# Altium footprint library WR-PHD_Socket Header.PcbLib: 279 footprints (part 13 of 18)
Each footprint in its own frame and in the unit in brackets; x right, y up, seen from the top. Pads: shape width x height; smd on the part's side, far side on the other; paste and mask are expansions set on the pad; w line width, h text height; cw(c..) or ccw(c..) is an arc to the next point about the centre after c.
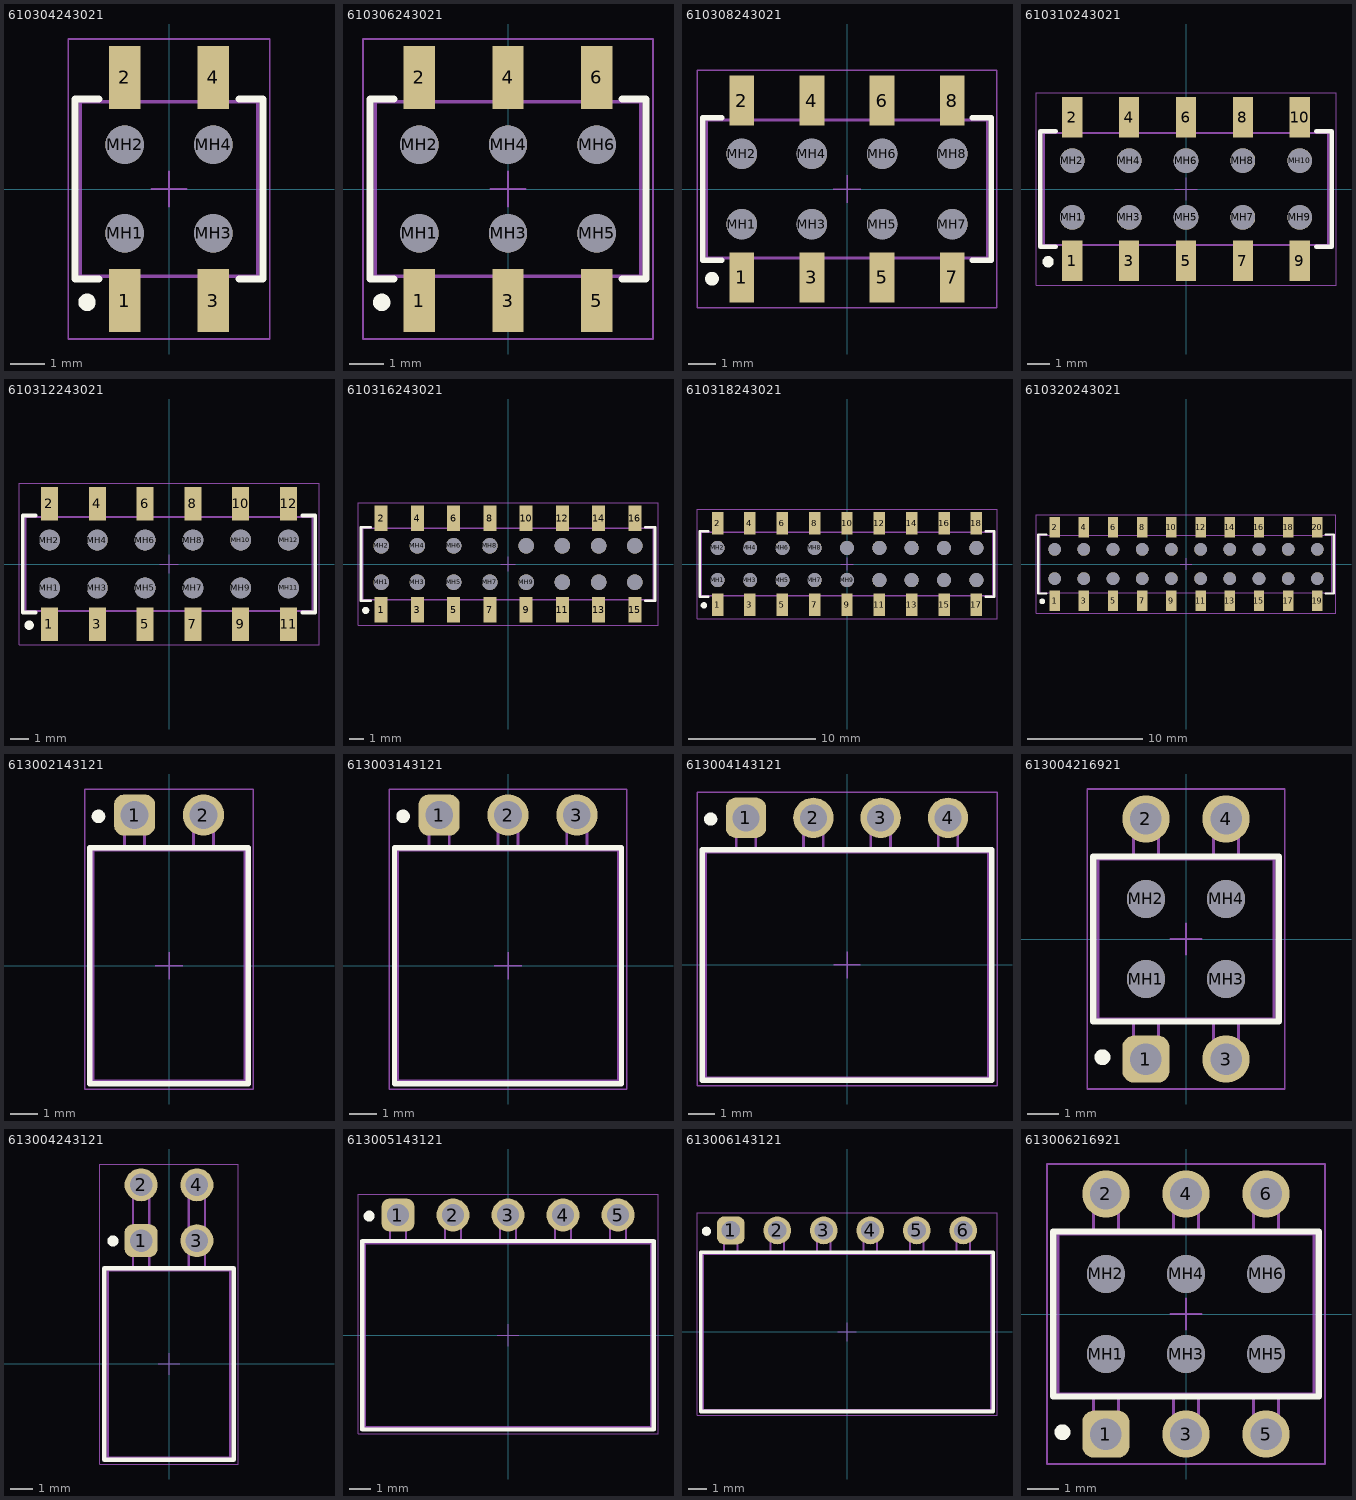
[diagram p12: the footprints below, top view; thin cyan lines are the x and y axes]

## 610304243021 [mm] "Socket Header, Pitch 2.54 mm, SMT, Vertical, dual row, 4p"
height 3.7
pads (8):
  rect 0.9x1.8 smd: 1(-1.27,-3.2) 2(-1.27,3.2) 3(1.27,-3.2) 4(1.27,3.2)
  round 1.1 hole 1.1 unplated: MH1(-1.27,-1.27) MH2(-1.27,1.27) MH3(1.27,-1.27) MH4(1.27,1.27)
Top Overlay:
  circle w0.25: c-2.35,-3.25 r0.125
  lines w0.2: -2,-2.575 -2.69,-2.575 -2.69,2.575 -2,2.575 ; 2,-2.575 2.69,-2.575 2.69,2.575 2,2.575
Top Designator:
  text ".Designator" at -7.498,-0.5 h1.5
Top Component Outline:
  lines w0.1: -1.52,-2.5 -1.52,-3.6 -1.02,-3.6 -1.02,-2.5 ; -1.52,2.5 -1.52,3.6 -1.02,3.6 -1.02,2.5 ; 1.02,-2.5 1.02,-3.6 1.52,-3.6 1.52,-2.5 ; 1.02,2.5 1.02,3.6 1.52,3.6 1.52,2.5 ; -2.54,-2.5 -2.54,2.5 2.54,2.5 2.54,-2.5 -2.54,-2.5
Top Courtyard:
  lines w0.05: -2.89,-4.3 -2.89,4.3 2.89,4.3 2.89,-4.3 -2.89,-4.3
Top Component Center:
  lines w0.05: -0.5,0 0.5,0 ; 0,-0.5 0,0.5
3D body "610304243021.stp": height 4.69, standoff 0, extent -2.54,-3.601 2.54,3.601

## 610306243021 [mm] "Socket Header, Pitch 2.54 mm, SMT, Vertical, dual row, 6p"
height 3.7
pads (12):
  rect 0.9x1.8 smd: 1(-2.54,-3.2) 2(-2.54,3.2) 3(0,-3.2) 4(0,3.2) 5(2.54,-3.2) 6(2.54,3.2)
  round 1.1 hole 1.1 unplated: MH1(-2.54,-1.27) MH2(-2.54,1.27) MH3(0,-1.27) MH4(0,1.27) MH5(2.54,-1.27) MH6(2.54,1.27)
Top Overlay:
  circle w0.25: c-3.62,-3.25 r0.125
  lines w0.2: -3.27,-2.575 -3.96,-2.575 -3.96,2.575 -3.27,2.575 ; 3.27,-2.575 3.96,-2.575 3.96,2.575 3.27,2.575
Top Designator:
  text ".Designator" at -7.498,-0.5 h1.5
Top Component Outline:
  lines w0.1: -2.79,-2.5 -2.79,-3.6 -2.29,-3.6 -2.29,-2.5 ; -2.79,2.5 -2.79,3.6 -2.29,3.6 -2.29,2.5 ; -0.25,-2.5 -0.25,-3.6 0.25,-3.6 0.25,-2.5 ; -0.25,2.5 -0.25,3.6 0.25,3.6 0.25,2.5 ; 2.29,-2.5 2.29,-3.6 2.79,-3.6 2.79,-2.5 ; 2.29,2.5 2.29,3.6 2.79,3.6 2.79,2.5 ; -3.81,-2.5 -3.81,2.5 3.81,2.5 3.81,-2.5 -3.81,-2.5
Top Courtyard:
  lines w0.05: -4.16,-4.3 4.16,-4.3 4.16,4.3 -4.16,4.3 -4.16,-4.3
Top Component Center:
  lines w0.05: -0.5,0 0.5,0 ; 0,-0.5 0,0.5
3D body "610306243021.stp": height 4.68, standoff 0, extent -3.81,-3.601 3.81,3.601

## 610308243021 [mm] "Socket Header, Pitch 2.54 mm, SMT, Vertical, dual row, 8p"
height 3.7
pads (16):
  rect 0.9x1.8 smd: 1(-3.81,-3.2) 2(-3.81,3.2) 3(-1.27,-3.2) 4(-1.27,3.2) 5(1.27,-3.2) 6(1.27,3.2) 7(3.81,-3.2) 8(3.81,3.2)
  round 1.1 hole 1.1 unplated: MH1(-3.81,-1.27) MH2(-3.81,1.27) MH3(-1.27,-1.27) MH4(-1.27,1.27) MH5(1.27,-1.27) MH6(1.27,1.27) MH7(3.81,-1.27) MH8(3.81,1.27)
Top Overlay:
  circle w0.25: c-4.89,-3.25 r0.125
  lines w0.2: -4.54,-2.575 -5.23,-2.575 -5.23,2.575 -4.54,2.575 ; 4.54,-2.575 5.23,-2.575 5.23,2.575 4.54,2.575
Top Designator:
  text ".Designator" at -7.498,-0.5 h1.5
Top Component Outline:
  lines w0.1: -4.06,-2.5 -4.06,-3.6 -3.56,-3.6 -3.56,-2.5 ; -4.06,2.5 -4.06,3.6 -3.56,3.6 -3.56,2.5 ; -1.52,-2.5 -1.52,-3.6 -1.02,-3.6 -1.02,-2.5 ; -1.52,2.5 -1.52,3.6 -1.02,3.6 -1.02,2.5 ; 1.02,-2.5 1.02,-3.6 1.52,-3.6 1.52,-2.5 ; 1.02,2.5 1.02,3.6 1.52,3.6 1.52,2.5 ; 3.56,-2.5 3.56,-3.6 4.06,-3.6 4.06,-2.5 ; 3.56,2.5 3.56,3.6 4.06,3.6 4.06,2.5 ; -5.08,-2.5 5.08,-2.5 5.08,2.5 -5.08,2.5 -5.08,-2.5
Top Courtyard:
  lines w0.05: -5.43,-4.3 5.43,-4.3 5.43,4.3 -5.43,4.3 -5.43,-4.3
Top Component Center:
  lines w0.05: -0.5,0 0.5,0 ; 0,-0.5 0,0.5
3D body "610308243021.stp": height 4.68, standoff 0, extent -5.08,-3.601 5.08,3.601

## 610310243021 [mm] "Socket Header, Pitch 2.54 mm, SMT, Vertical, dual row, 10p"
height 3.7
pads (20):
  rect 0.9x1.8 smd: 1(-5.08,-3.2) 2(-5.08,3.2) 3(-2.54,-3.2) 4(-2.54,3.2) 5(0,-3.2) 6(0,3.2) 7(2.54,-3.2) 8(2.54,3.2) 9(5.08,-3.2) 10(5.08,3.2)
  round 1.1 hole 1.1 unplated: MH1(-5.08,-1.27) MH2(-5.08,1.27) MH3(-2.54,-1.27) MH4(-2.54,1.27) MH5(0,-1.27) MH6(0,1.27) MH7(2.54,-1.27) MH8(2.54,1.27) MH9(5.08,-1.27) MH10(5.08,1.27)
Top Overlay:
  circle w0.25: c-6.16,-3.25 r0.125
  lines w0.2: -5.81,-2.575 -6.5,-2.575 -6.5,2.575 -5.81,2.575 ; 5.81,-2.575 6.5,-2.575 6.5,2.575 5.81,2.575
Top Designator:
  text ".Designator" at -7.498,-0.5 h1.5
Top Component Outline:
  lines w0.1: -5.33,-2.5 -5.33,-3.6 -4.83,-3.6 -4.83,-2.5 ; -5.33,2.5 -5.33,3.6 -4.83,3.6 -4.83,2.5 ; -2.79,-2.5 -2.79,-3.6 -2.29,-3.6 -2.29,-2.5 ; -2.79,2.5 -2.79,3.6 -2.29,3.6 -2.29,2.5 ; -0.25,-2.5 -0.25,-3.6 0.25,-3.6 0.25,-2.5 ; -0.25,2.5 -0.25,3.6 0.25,3.6 0.25,2.5 ; 2.29,-2.5 2.29,-3.6 2.79,-3.6 2.79,-2.5 ; 2.29,2.5 2.29,3.6 2.79,3.6 2.79,2.5 ; 4.83,-2.5 4.83,-3.6 5.33,-3.6 5.33,-2.5 ; 4.83,2.5 4.83,3.6 5.33,3.6 5.33,2.5 ; -6.35,-2.5 -6.35,2.5 6.35,2.5 6.35,-2.5 -6.35,-2.5
Top Courtyard:
  lines w0.05: -6.7,-4.3 6.7,-4.3 6.7,4.3 -6.7,4.3 -6.7,-4.3
Top Component Center:
  lines w0.05: -0.5,0 0.5,0 ; 0,-0.5 0,0.5
3D body "610310243021.stp": height 4.68, standoff 0, extent -6.35,-3.601 6.35,3.601

## 610312243021 [mm] "Socket Header, Pitch 2.54 mm, SMT, Vertical, dual row, 12p"
height 3.7
pads (24):
  rect 0.9x1.8 smd: 1(-6.35,-3.2) 2(-6.35,3.2) 3(-3.81,-3.2) 4(-3.81,3.2) 5(-1.27,-3.2) 6(-1.27,3.2) 7(1.27,-3.2) 8(1.27,3.2) 9(3.81,-3.2) 10(3.81,3.2) 11(6.35,-3.2) 12(6.35,3.2)
  round 1.1 hole 1.1 unplated: MH1(-6.35,-1.27) MH2(-6.35,1.27) MH3(-3.81,-1.27) MH4(-3.81,1.27) MH5(-1.27,-1.27) MH6(-1.27,1.27) MH7(1.27,-1.27) MH8(1.27,1.27) MH9(3.81,-1.27) MH10(3.81,1.27) MH11(6.35,-1.27) MH12(6.35,1.27)
Top Overlay:
  circle w0.25: c-7.43,-3.25 r0.125
  lines w0.2: -7.08,-2.575 -7.77,-2.575 -7.77,2.575 -7.08,2.575 ; 7.08,-2.575 7.77,-2.575 7.77,2.575 7.08,2.575
Top Designator:
  text ".Designator" at -7.498,-0.5 h1.5
Top Component Outline:
  lines w0.1: -6.6,-2.5 -6.6,-3.6 -6.1,-3.6 -6.1,-2.5 ; -6.6,2.5 -6.6,3.6 -6.1,3.6 -6.1,2.5 ; -4.06,-2.5 -4.06,-3.6 -3.56,-3.6 -3.56,-2.5 ; -4.06,2.5 -4.06,3.6 -3.56,3.6 -3.56,2.5 ; -1.52,-2.5 -1.52,-3.6 -1.02,-3.6 -1.02,-2.5 ; -1.52,2.5 -1.52,3.6 -1.02,3.6 -1.02,2.5 ; 1.02,-2.5 1.02,-3.6 1.52,-3.6 1.52,-2.5 ; 1.02,2.5 1.02,3.6 1.52,3.6 1.52,2.5 ; 3.56,-2.5 3.56,-3.6 4.06,-3.6 4.06,-2.5 ; 3.56,2.5 3.56,3.6 4.06,3.6 4.06,2.5 ; 6.1,-2.5 6.1,-3.6 6.6,-3.6 6.6,-2.5 ; 6.1,2.5 6.1,3.6 6.6,3.6 6.6,2.5 ; -7.62,-2.5 -7.62,2.5 7.62,2.5 7.62,-2.5 -7.62,-2.5
Top Courtyard:
  lines w0.05: -7.97,-4.3 7.97,-4.3 7.97,4.3 -7.97,4.3 -7.97,-4.3
Top Component Center:
  lines w0.05: -0.5,0 0.5,0 ; 0,-0.5 0,0.5
3D body "610312243021.stp": height 4.68, standoff 0, extent -7.62,-3.601 7.62,3.601

## 610316243021 [mm] "Socket Header, Pitch 2.54 mm, SMT, Vertical, dual row, 16p"
height 3.7
pads (32):
  rect 0.9x1.8 smd: 1(-8.89,-3.2) 2(-8.89,3.2) 3(-6.35,-3.2) 4(-6.35,3.2) 5(-3.81,-3.2) 6(-3.81,3.2) 7(-1.27,-3.2) 8(-1.27,3.2) 9(1.27,-3.2) 10(1.27,3.2) 11(3.81,-3.2) 12(3.81,3.2) 13(6.35,-3.2) 14(6.35,3.2) 15(8.89,-3.2) 16(8.89,3.2)
  round 1.1 hole 1.1 unplated: MH1(-8.89,-1.27) MH2(-8.89,1.27) MH3(-6.35,-1.27) MH4(-6.35,1.27) MH5(-3.81,-1.27) MH6(-3.81,1.27) MH7(-1.27,-1.27) MH8(-1.27,1.27) MH9(1.27,-1.27) MH10(1.27,1.27) MH11(3.81,-1.27) MH12(3.81,1.27) MH13(6.35,-1.27) MH14(6.35,1.27) MH15(8.89,-1.27) MH16(8.89,1.27)
Top Overlay:
  circle w0.25: c-9.97,-3.25 r0.125
  lines w0.2: -9.62,-2.575 -10.31,-2.575 -10.31,2.575 -9.62,2.575 ; 9.62,-2.575 10.31,-2.575 10.31,2.575 9.62,2.575
Top Designator:
  text ".Designator" at -7.498,-0.5 h1.5
Top Component Outline:
  lines w0.1: -9.14,-2.5 -9.14,-3.6 -8.64,-3.6 -8.64,-2.5 ; -9.14,2.5 -9.14,3.6 -8.64,3.6 -8.64,2.5 ; -6.6,-2.5 -6.6,-3.6 -6.1,-3.6 -6.1,-2.5 ; -6.6,2.5 -6.6,3.6 -6.1,3.6 -6.1,2.5 ; -4.06,-2.5 -4.06,-3.6 -3.56,-3.6 -3.56,-2.5 ; -4.06,2.5 -4.06,3.6 -3.56,3.6 -3.56,2.5 ; -1.52,-2.5 -1.52,-3.6 -1.02,-3.6 -1.02,-2.5 ; -1.52,2.5 -1.52,3.6 -1.02,3.6 -1.02,2.5 ; 1.02,-2.5 1.02,-3.6 1.52,-3.6 1.52,-2.5 ; 1.02,2.5 1.02,3.6 1.52,3.6 1.52,2.5 ; 3.56,-2.5 3.56,-3.6 4.06,-3.6 4.06,-2.5 ; 3.56,2.5 3.56,3.6 4.06,3.6 4.06,2.5 ; 6.1,-2.5 6.1,-3.6 6.6,-3.6 6.6,-2.5 ; 6.1,2.5 6.1,3.6 6.6,3.6 6.6,2.5 ; 8.64,-2.5 8.64,-3.6 9.14,-3.6 9.14,-2.5 ; 8.64,2.5 8.64,3.6 9.14,3.6 9.14,2.5 ; -10.16,-2.5 10.16,-2.5 10.16,2.5 -10.16,2.5 -10.16,-2.5
Top Courtyard:
  lines w0.05: -10.51,-4.3 -10.51,4.3 10.51,4.3 10.51,-4.3 -10.51,-4.3
Top Component Center:
  lines w0.05: -0.5,0 0.5,0 ; 0,-0.5 0,0.5
3D body "610316243021.stp": height 4.68, standoff 0, extent -10.16,-3.601 10.16,3.601

## 610318243021 [mm] "Socket Header, Pitch 2.54 mm, SMT, Vertical, dual row, 18p"
height 3.7
pads (36):
  rect 0.9x1.8 smd: 1(-10.16,-3.2) 2(-10.16,3.2) 3(-7.62,-3.2) 4(-7.62,3.2) 5(-5.08,-3.2) 6(-5.08,3.2) 7(-2.54,-3.2) 8(-2.54,3.2) 9(0,-3.2) 10(0,3.2) 11(2.54,-3.2) 12(2.54,3.2) 13(5.08,-3.2) 14(5.08,3.2) 15(7.62,-3.2) 16(7.62,3.2) 17(10.16,-3.2) 18(10.16,3.2)
  round 1.1 hole 1.1 unplated: MH1(-10.16,-1.27) MH2(-10.16,1.27) MH3(-7.62,-1.27) MH4(-7.62,1.27) MH5(-5.08,-1.27) MH6(-5.08,1.27) MH7(-2.54,-1.27) MH8(-2.54,1.27) MH9(0,-1.27) MH10(0,1.27) MH11(2.54,-1.27) MH12(2.54,1.27) MH13(5.08,-1.27) MH14(5.08,1.27) MH15(7.62,-1.27) MH16(7.62,1.27) MH17(10.16,-1.27) MH18(10.16,1.27)
Top Overlay:
  circle w0.25: c-11.24,-3.25 r0.125
  lines w0.2: -10.89,-2.575 -11.58,-2.575 -11.58,2.575 -10.89,2.575 ; 10.89,-2.575 11.58,-2.575 11.58,2.575 10.89,2.575
Top Designator:
  text ".Designator" at -7.498,-0.5 h1.5
Top Component Outline:
  lines w0.1: -10.41,-2.5 -10.41,-3.6 -9.91,-3.6 -9.91,-2.5 ; -10.41,2.5 -10.41,3.6 -9.91,3.6 -9.91,2.5 ; -7.87,-2.5 -7.87,-3.6 -7.37,-3.6 -7.37,-2.5 ; -7.87,2.5 -7.87,3.6 -7.37,3.6 -7.37,2.5 ; -5.33,-2.5 -5.33,-3.6 -4.83,-3.6 -4.83,-2.5 ; -5.33,2.5 -5.33,3.6 -4.83,3.6 -4.83,2.5 ; -2.79,-2.5 -2.79,-3.6 -2.29,-3.6 -2.29,-2.5 ; -2.79,2.5 -2.79,3.6 -2.29,3.6 -2.29,2.5 ; -0.25,-2.5 -0.25,-3.6 0.25,-3.6 0.25,-2.5 ; -0.25,2.5 -0.25,3.6 0.25,3.6 0.25,2.5 ; 2.29,-2.5 2.29,-3.6 2.79,-3.6 2.79,-2.5 ; 2.29,2.5 2.29,3.6 2.79,3.6 2.79,2.5 ; 4.83,-2.5 4.83,-3.6 5.33,-3.6 5.33,-2.5 ; 4.83,2.5 4.83,3.6 5.33,3.6 5.33,2.5 ; 7.37,-2.5 7.37,-3.6 7.87,-3.6 7.87,-2.5 ; 7.37,2.5 7.37,3.6 7.87,3.6 7.87,2.5 ; 9.91,-2.5 9.91,-3.6 10.41,-3.6 10.41,-2.5 ; 9.91,2.5 9.91,3.6 10.41,3.6 10.41,2.5 ; -11.43,-2.5 -11.43,2.5 11.43,2.5 11.43,-2.5 -11.43,-2.5
Top Courtyard:
  lines w0.05: -11.78,-4.3 -11.78,4.3 11.78,4.3 11.78,-4.3 -11.78,-4.3
Top Component Center:
  lines w0.05: -0.5,0 0.5,0 ; 0,-0.5 0,0.5
3D body "610318243021.stp": height 4.68, standoff 0, extent -11.43,-3.601 11.43,3.601

## 610320243021 [mm] "Socket Header, Pitch 2.54 mm, SMT, Vertical, dual row, 20p"
height 3.7
pads (40):
  rect 0.9x1.8 smd: 1(-11.43,-3.2) 2(-11.43,3.2) 3(-8.89,-3.2) 4(-8.89,3.2) 5(-6.35,-3.2) 6(-6.35,3.2) 7(-3.81,-3.2) 8(-3.81,3.2) 9(-1.27,-3.2) 10(-1.27,3.2) 11(1.27,-3.2) 12(1.27,3.2) 13(3.81,-3.2) 14(3.81,3.2) 15(6.35,-3.2) 16(6.35,3.2) 17(8.89,-3.2) 18(8.89,3.2) 19(11.43,-3.2) 20(11.43,3.2)
  round 1.1 hole 1.1 unplated: MH1(-11.43,-1.27) MH2(-11.43,1.27) MH3(-8.89,-1.27) MH4(-8.89,1.27) MH5(-6.35,-1.27) MH6(-6.35,1.27) MH7(-3.81,-1.27) MH8(-3.81,1.27) MH9(-1.27,-1.27) MH10(-1.27,1.27) MH11(1.27,-1.27) MH12(1.27,1.27) MH13(3.81,-1.27) MH14(3.81,1.27) MH15(6.35,-1.27) MH16(6.35,1.27) MH17(8.89,-1.27) MH18(8.89,1.27) MH19(11.43,-1.27) MH20(11.43,1.27)
Top Overlay:
  circle w0.25: c-12.51,-3.25 r0.125
  lines w0.2: -12.16,-2.575 -12.85,-2.575 -12.85,2.575 -12.16,2.575 ; 12.16,-2.575 12.85,-2.575 12.85,2.575 12.16,2.575
Top Designator:
  text ".Designator" at -7.498,-0.5 h1.5
Top Component Outline:
  lines w0.1: -11.68,-2.5 -11.68,-3.6 -11.18,-3.6 -11.18,-2.5 ; -11.68,2.5 -11.68,3.6 -11.18,3.6 -11.18,2.5 ; -9.14,-2.5 -9.14,-3.6 -8.64,-3.6 -8.64,-2.5 ; -9.14,2.5 -9.14,3.6 -8.64,3.6 -8.64,2.5 ; -6.6,-2.5 -6.6,-3.6 -6.1,-3.6 -6.1,-2.5 ; -6.6,2.5 -6.6,3.6 -6.1,3.6 -6.1,2.5 ; -4.06,-2.5 -4.06,-3.6 -3.56,-3.6 -3.56,-2.5 ; -4.06,2.5 -4.06,3.6 -3.56,3.6 -3.56,2.5 ; -1.52,-2.5 -1.52,-3.6 -1.02,-3.6 -1.02,-2.5 ; -1.52,2.5 -1.52,3.6 -1.02,3.6 -1.02,2.5 ; 1.02,-2.5 1.02,-3.6 1.52,-3.6 1.52,-2.5 ; 1.02,2.5 1.02,3.6 1.52,3.6 1.52,2.5 ; 3.56,-2.5 3.56,-3.6 4.06,-3.6 4.06,-2.5 ; 3.56,2.5 3.56,3.6 4.06,3.6 4.06,2.5 ; 6.1,-2.5 6.1,-3.6 6.6,-3.6 6.6,-2.5 ; 6.1,2.5 6.1,3.6 6.6,3.6 6.6,2.5 ; 8.64,-2.5 8.64,-3.6 9.14,-3.6 9.14,-2.5 ; 8.64,2.5 8.64,3.6 9.14,3.6 9.14,2.5 ; 11.18,-2.5 11.18,-3.6 11.68,-3.6 11.68,-2.5 ; 11.18,2.5 11.18,3.6 11.68,3.6 11.68,2.5 ; -12.7,-2.5 -12.7,2.5 12.7,2.5 12.7,-2.5 -12.7,-2.5
Top Courtyard:
  lines w0.05: -13.05,-4.3 -13.05,4.3 13.05,4.3 13.05,-4.3 -13.05,-4.3
Top Component Center:
  lines w0.05: -0.5,0 0.5,0 ; 0,-0.5 0,0.5
3D body "610320243021.stp": height 4.68, standoff 0, extent -12.7,-3.601 12.7,3.601

## 613002143121 [mm] "Socket Header, Pitch 2.54 mm, THT, Angled, single row, 2p"
height 2.5
pads (2):
  rrect50% 1.52x1.52 hole 1.02: 1(-1.27,5.55)
  round 1.52 hole 1.02: 2(1.27,5.55)
Top Overlay:
  circle w0.25: c-2.6,5.5 r0.125
  lines w0.2: -2.915,-4.35 -2.915,4.35 2.915,4.35 2.915,-4.35 -2.915,-4.35
Top Designator:
  text ".Designator" at -7.498,-0.5 h1.5
Top Component Outline:
  lines w0.1: -1.64,4.25 -1.64,5.75 -0.9,5.75 -0.9,4.25 ; 0.9,4.25 0.9,5.75 1.64,5.75 1.64,4.25 ; -2.79,-4.25 -2.79,4.25 2.79,4.25 2.79,-4.25 -2.79,-4.25
Top Courtyard:
  lines w0.05: -3.115,-4.55 3.115,-4.55 3.115,6.51 -3.115,6.51 -3.115,-4.55
Top Component Center:
  lines w0.05: -0.5,0 0.5,0 ; 0,-0.5 0,0.5
3D body "613002143121.stp": height 2.55, standoff -3.04, extent -2.79,-4.25 2.79,5.75

## 613003143121 [mm] "Socket Header, Pitch 2.54 mm, THT, Angled, single row, 3p"
height 2.5
pads (3):
  rrect50% 1.52x1.52 hole 1.02: 1(-2.54,5.55)
  round 1.52 hole 1.02: 2(0,5.55) 3(2.54,5.55)
Top Overlay:
  circle w0.25: c-3.87,5.5 r0.125
  lines w0.2: -4.185,-4.35 4.185,-4.35 4.185,4.35 -4.185,4.35 -4.185,-4.35
Top Designator:
  text ".Designator" at -7.498,-0.5 h1.5
Top Component Outline:
  lines w0.1: -2.91,4.25 -2.91,5.75 -2.17,5.75 -2.17,4.25 ; -0.37,4.25 -0.37,5.75 0.37,5.75 0.37,4.25 ; 2.17,4.25 2.17,5.75 2.91,5.75 2.91,4.25 ; -4.06,-4.25 4.06,-4.25 4.06,4.25 -4.06,4.25 -4.06,-4.25
Top Courtyard:
  lines w0.05: -4.385,-4.55 -4.385,6.51 4.385,6.51 4.385,-4.55 -4.385,-4.55
Top Component Center:
  lines w0.05: -0.5,0 0.5,0 ; 0,-0.5 0,0.5
3D body "613003143121.stp": height 2.55, standoff -3.04, extent -4.06,-4.25 4.06,5.75

## 613004143121 [mm] "Socket Header, Pitch 2.54 mm, THT, Angled, single row, 4p"
height 2.5
pads (4):
  rrect50% 1.52x1.52 hole 1.02: 1(-3.81,5.55)
  round 1.52 hole 1.02: 2(-1.27,5.55) 3(1.27,5.55) 4(3.81,5.55)
Top Overlay:
  circle w0.25: c-5.14,5.5 r0.125
  lines w0.2: -5.455,-4.35 -5.455,4.35 5.455,4.35 5.455,-4.35 -5.455,-4.35
Top Designator:
  text ".Designator" at -7.498,-0.5 h1.5
Top Component Outline:
  lines w0.1: -4.18,4.25 -4.18,5.75 -3.44,5.75 -3.44,4.25 ; -1.64,4.25 -1.64,5.75 -0.9,5.75 -0.9,4.25 ; 0.9,4.25 0.9,5.75 1.64,5.75 1.64,4.25 ; 3.44,4.25 3.44,5.75 4.18,5.75 4.18,4.25 ; -5.33,-4.25 5.33,-4.25 5.33,4.25 -5.33,4.25 -5.33,-4.25
Top Courtyard:
  lines w0.05: -5.655,-4.55 5.655,-4.55 5.655,6.51 -5.655,6.51 -5.655,-4.55
Top Component Center:
  lines w0.05: -0.5,0 0.5,0 ; 0,-0.5 0,0.5
3D body "613004143121.stp": height 2.55, standoff -3.04, extent -5.33,-4.25 5.33,5.75

## 613004216921 [mm] "Socket Header, Pitch 2.54 mm, THT, Vertical, dual row, 4p"
height 5
pads (8):
  rrect50% 1.5x1.5 hole 1: 1(-1.27,-3.81)
  round 1.5 hole 1: 2(-1.27,3.81) 3(1.27,-3.81) 4(1.27,3.81)
  round 1.2 hole 1.2 unplated: MH1(-1.27,-1.27) MH2(-1.27,1.27) MH3(1.27,-1.27) MH4(1.27,1.27)
Top Overlay:
  circle w0.25: c-2.65,-3.75 r0.125
  lines w0.2: -2.94,-2.615 -2.94,2.615 2.94,2.615 2.94,-2.615 -2.94,-2.615
Top Designator:
  text ".Designator" at -7.498,-0.5 h1.5
Top Component Outline:
  lines w0.1: -1.67,-2.54 -1.67,-3.935 -0.87,-3.935 -0.87,-2.54 ; -1.67,2.54 -1.67,3.935 -0.87,3.935 -0.87,2.54 ; 0.87,-2.54 0.87,-3.935 1.67,-3.935 1.67,-2.54 ; 0.87,2.54 0.87,3.935 1.67,3.935 1.67,2.54 ; -2.79,-2.54 2.79,-2.54 2.79,2.54 -2.79,2.54 -2.79,-2.54
Top Courtyard:
  lines w0.05: -3.14,-4.76 -3.14,4.76 3.14,4.76 3.14,-4.76 -3.14,-4.76
Top Component Center:
  lines w0.05: -0.5,0 0.5,0 ; 0,-0.5 0,0.5
3D body "613004216921.stp": height 5.02, standoff -3.08, extent -2.79,-3.935 2.79,3.935

## 613004243121 [mm] "Socket Header, Pitch 2.54 mm, THT, Angled, dual row, 4p"
height 5.08
pads (4):
  rrect50% 1.5x1.5 hole 1.03: 1(-1.27,5.61)
  round 1.5 hole 1.03: 2(-1.27,8.15) 3(1.27,5.61) 4(1.27,8.15)
Top Overlay:
  circle w0.25: c-2.55,5.6 r0.125
  lines w0.2: -2.94,-4.35 -2.94,4.35 2.94,4.35 2.94,-4.35 -2.94,-4.35
Top Designator:
  text ".Designator" at -7.498,-0.5 h1.5
Top Component Outline:
  lines w0.1: -1.64,4.25 -1.64,8.35 -0.9,8.35 -0.9,4.25 ; -1.64,5.81 -0.9,5.81 ; 0.9,4.25 0.9,8.35 1.64,8.35 1.64,4.25 ; 0.9,5.81 1.64,5.81 ; -2.79,-4.25 -2.79,4.25 2.79,4.25 2.79,-4.25 -2.79,-4.25
Top Courtyard:
  lines w0.05: -3.14,-4.55 3.14,-4.55 3.14,9.1 -3.14,9.1 -3.14,-4.55
Top Component Center:
  lines w0.05: -0.5,0 0.5,0 ; 0,-0.5 0,0.5
3D body "613004243121.stp": height 5.05, standoff -3.25, extent -2.79,-4.25 2.79,8.35

## 613005143121 [mm] "Socket Header, Pitch 2.54 mm, THT, Angled, single row, 5p"
height 2.5
pads (5):
  rrect50% 1.52x1.52 hole 1.02: 1(-5.08,5.55)
  round 1.52 hole 1.02: 2(-2.54,5.55) 3(0,5.55) 4(2.54,5.55) 5(5.08,5.55)
Top Overlay:
  circle w0.25: c-6.41,5.5 r0.125
  lines w0.2: -6.725,-4.35 -6.725,4.35 6.725,4.35 6.725,-4.35 -6.725,-4.35
Top Designator:
  text ".Designator" at -7.498,-0.5 h1.5
Top Component Outline:
  lines w0.1: -5.45,4.25 -5.45,5.75 -4.71,5.75 -4.71,4.25 ; -2.91,4.25 -2.91,5.75 -2.17,5.75 -2.17,4.25 ; -0.37,4.25 -0.37,5.75 0.37,5.75 0.37,4.25 ; 2.17,4.25 2.17,5.75 2.91,5.75 2.91,4.25 ; 4.71,4.25 4.71,5.75 5.45,5.75 5.45,4.25 ; -6.6,-4.25 6.6,-4.25 6.6,4.25 -6.6,4.25 -6.6,-4.25
Top Courtyard:
  lines w0.05: -6.925,-4.55 6.925,-4.55 6.925,6.51 -6.925,6.51 -6.925,-4.55
Top Component Center:
  lines w0.05: -0.5,0 0.5,0 ; 0,-0.5 0,0.5
3D body "613005143121.stp": height 2.55, standoff -3.04, extent -6.6,-4.25 6.6,5.75

## 613006143121 [mm] "Socket Header, Pitch 2.54 mm, THT, Angled, single row, 6p"
height 2.5
pads (6):
  rrect50% 1.52x1.52 hole 1.02: 1(-6.35,5.55)
  round 1.52 hole 1.02: 2(-3.81,5.55) 3(-1.27,5.55) 4(1.27,5.55) 5(3.81,5.55) 6(6.35,5.55)
Top Overlay:
  circle w0.25: c-7.68,5.5 r0.125
  lines w0.2: -7.995,-4.35 7.995,-4.35 7.995,4.35 -7.995,4.35 -7.995,-4.35
Top Designator:
  text ".Designator" at -7.498,-0.5 h1.5
Top Component Outline:
  lines w0.1: -6.72,4.25 -6.72,5.75 -5.98,5.75 -5.98,4.25 ; -4.18,4.25 -4.18,5.75 -3.44,5.75 -3.44,4.25 ; -1.64,4.25 -1.64,5.75 -0.9,5.75 -0.9,4.25 ; 0.9,4.25 0.9,5.75 1.64,5.75 1.64,4.25 ; 3.44,4.25 3.44,5.75 4.18,5.75 4.18,4.25 ; 5.98,4.25 5.98,5.75 6.72,5.75 6.72,4.25 ; -7.87,-4.25 7.87,-4.25 7.87,4.25 -7.87,4.25 -7.87,-4.25
Top Courtyard:
  lines w0.05: -8.195,-4.55 -8.195,6.51 8.195,6.51 8.195,-4.55 -8.195,-4.55
Top Component Center:
  lines w0.05: -0.5,0 0.5,0 ; 0,-0.5 0,0.5
3D body "613006143121.stp": height 2.55, standoff -3.04, extent -7.87,-4.25 7.87,5.75

## 613006216921 [mm] "Socket Header, Pitch 2.54 mm, THT, Vertical, dual row, 6p"
height 5
pads (12):
  rrect50% 1.5x1.5 hole 1: 1(-2.54,-3.81)
  round 1.5 hole 1: 2(-2.54,3.81) 3(0,-3.81) 4(0,3.81) 5(2.54,-3.81) 6(2.54,3.81)
  round 1.2 hole 1.2 unplated: MH1(-2.54,-1.27) MH2(-2.54,1.27) MH3(0,-1.27) MH4(0,1.27) MH5(2.54,-1.27) MH6(2.54,1.27)
Top Overlay:
  circle w0.25: c-3.92,-3.75 r0.125
  lines w0.2: -4.21,-2.615 -4.21,2.615 4.21,2.615 4.21,-2.615 -4.21,-2.615
Top Designator:
  text ".Designator" at -7.498,-0.5 h1.5
Top Component Outline:
  lines w0.1: -2.94,-2.54 -2.94,-3.935 -2.14,-3.935 -2.14,-2.54 ; -2.94,2.54 -2.94,3.935 -2.14,3.935 -2.14,2.54 ; -0.4,-2.54 -0.4,-3.935 0.4,-3.935 0.4,-2.54 ; -0.4,2.54 -0.4,3.935 0.4,3.935 0.4,2.54 ; 2.14,-2.54 2.14,-3.935 2.94,-3.935 2.94,-2.54 ; 2.14,2.54 2.14,3.935 2.94,3.935 2.94,2.54 ; -4.06,-2.54 4.06,-2.54 4.06,2.54 -4.06,2.54 -4.06,-2.54
Top Courtyard:
  lines w0.05: -4.41,-4.76 -4.41,4.76 4.41,4.76 4.41,-4.76 -4.41,-4.76
Top Component Center:
  lines w0.05: -0.5,0 0.5,0 ; 0,-0.5 0,0.5
3D body "613006216921.stp": height 5.02, standoff -3.08, extent -4.06,-3.935 4.06,3.935